# Altium footprint library semubot_lidar_driver_footprints.PcbLib: 25 footprints (part 2 of 2)
Each footprint in its own frame and in the unit in brackets; x right, y up, seen from the top. Pads: shape width x height; smd on the part's side, far side on the other; paste and mask are expansions set on the pad; w line width, h text height; cw(c..) or ccw(c..) is an arc to the next point about the centre after c.
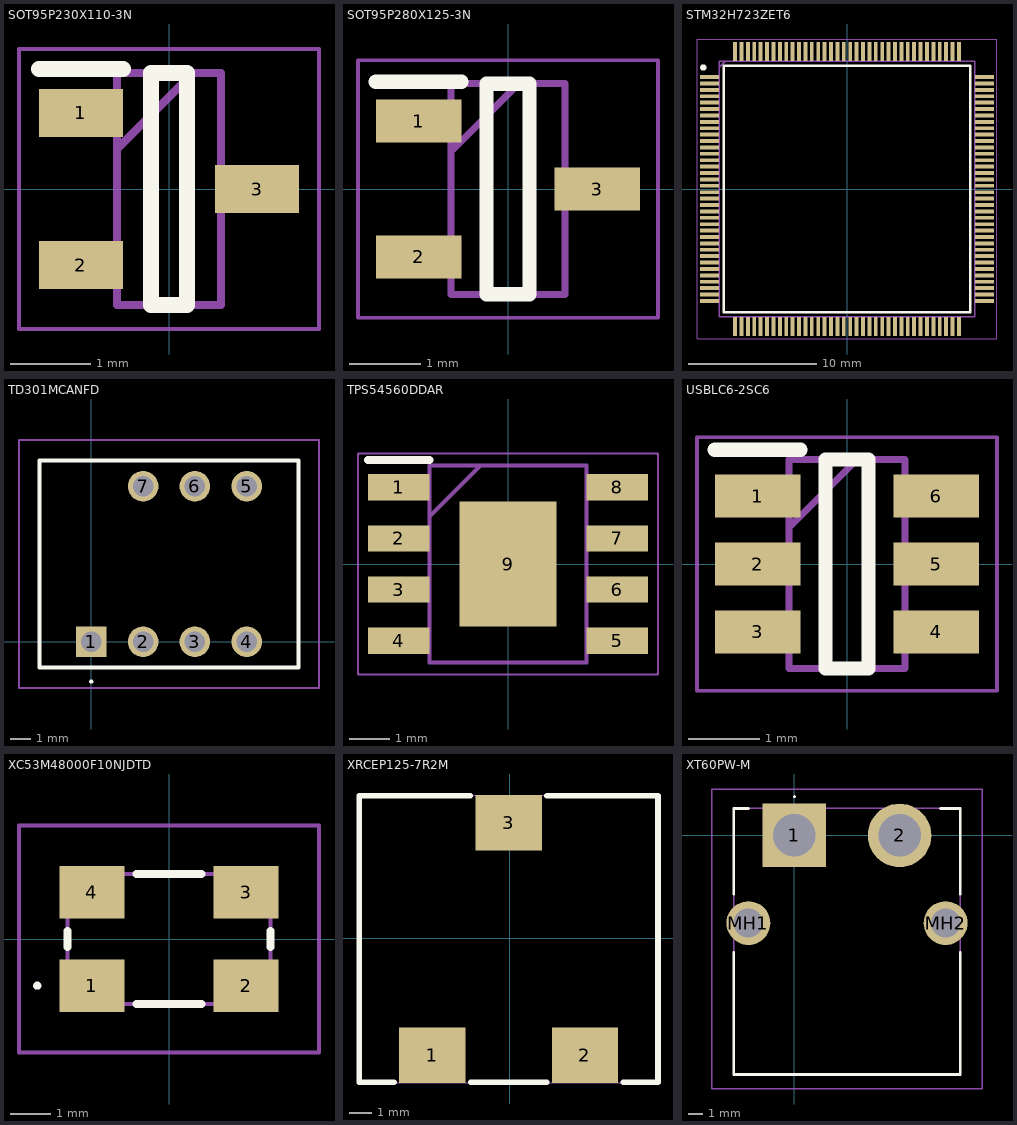
[diagram p1: the footprints below, top view; thin cyan lines are the x and y axes]

## SOT95P230X110-3N [mm]
pads (3):
  rect 1.05x0.6 smd: 1(-1.1,0.95) 2(-1.1,-0.95) 3(1.1,0)
Top Overlay:
  lines w0.2: -1.625,1.5 -0.575,1.5 ; -0.225,-1.45 0.225,-1.45 0.225,1.45 -0.225,1.45 -0.225,-1.45
Mechanical 13:
  lines w0.1: -0.65,0.5 0.3,1.45 ; -0.65,-1.45 0.65,-1.45 0.65,1.45 -0.65,1.45 -0.65,-1.45
Mechanical 15:
  lines w0.05: -1.875,-1.75 1.875,-1.75 1.875,1.75 -1.875,1.75 -1.875,-1.75
3D body "PESD1CAN.stp": height 1.1, standoff 0, extent -1.15,-1.45 1.15,1.45

## SOT95P280X125-3N [mm]
pads (3):
  rect 1.2x0.6 smd: 1(-1.25,0.95) 2(-1.25,-0.95) 3(1.25,0)
Top Overlay:
  lines w0.2: -1.85,1.5 -0.65,1.5 ; -0.3,-1.475 0.3,-1.475 0.3,1.475 -0.3,1.475 -0.3,-1.475
Mechanical 13:
  lines w0.1: -0.8,0.525 0.15,1.475 ; -0.8,-1.475 0.8,-1.475 0.8,1.475 -0.8,1.475 -0.8,-1.475
Mechanical 15:
  lines w0.05: -2.1,-1.8 2.1,-1.8 2.1,1.8 -2.1,1.8 -2.1,-1.8
3D body "AO3401A.stp": height 1.25, standoff 0, extent -1.4,-1.475 1.4,1.475

## STM32H723ZET6 [mm]
pads (144):
  rect 1.475x0.3 smd: 1(-10.738,8.75) 2(-10.738,8.25) 3(-10.738,7.75) 4(-10.738,7.25) 5(-10.738,6.75) 6(-10.738,6.25) 7(-10.738,5.75) 8(-10.738,5.25) 9(-10.738,4.75) 10(-10.738,4.25) 11(-10.738,3.75) 12(-10.738,3.25) 13(-10.738,2.75) 14(-10.738,2.25) 15(-10.738,1.75) 16(-10.738,1.25) 17(-10.738,0.75) 18(-10.738,0.25) 19(-10.738,-0.25) 20(-10.738,-0.75) 21(-10.738,-1.25) 22(-10.738,-1.75) 23(-10.738,-2.25) 24(-10.738,-2.75) 25(-10.738,-3.25) 26(-10.738,-3.75) 27(-10.738,-4.25) 28(-10.738,-4.75) 29(-10.738,-5.25) 30(-10.738,-5.75) 31(-10.738,-6.25) 32(-10.738,-6.75) 33(-10.738,-7.25) 34(-10.738,-7.75) 35(-10.738,-8.25) 36(-10.738,-8.75) 73(10.738,-8.75) 74(10.738,-8.25) 75(10.738,-7.75) 76(10.738,-7.25) 77(10.738,-6.75) 78(10.738,-6.25) 79(10.738,-5.75) 80(10.738,-5.25) 81(10.738,-4.75) 82(10.738,-4.25) 83(10.738,-3.75) 84(10.738,-3.25) 85(10.738,-2.75) 86(10.738,-2.25) 87(10.738,-1.75) 88(10.738,-1.25) 89(10.738,-0.75) 90(10.738,-0.25) 91(10.738,0.25) 92(10.738,0.75) 93(10.738,1.25) 94(10.738,1.75) 95(10.738,2.25) 96(10.738,2.75) 97(10.738,3.25) 98(10.738,3.75) 99(10.738,4.25) 100(10.738,4.75) 101(10.738,5.25) 102(10.738,5.75) 103(10.738,6.25) 104(10.738,6.75) 105(10.738,7.25) 106(10.738,7.75) 107(10.738,8.25) 108(10.738,8.75)
  rect 0.3x1.475 smd: 37(-8.75,-10.738) 38(-8.25,-10.738) 39(-7.75,-10.738) 40(-7.25,-10.738) 41(-6.75,-10.738) 42(-6.25,-10.738) 43(-5.75,-10.738) 44(-5.25,-10.738) 45(-4.75,-10.738) 46(-4.25,-10.738) 47(-3.75,-10.738) 48(-3.25,-10.738) 49(-2.75,-10.738) 50(-2.25,-10.738) 51(-1.75,-10.738) 52(-1.25,-10.738) 53(-0.75,-10.738) 54(-0.25,-10.738) 55(0.25,-10.738) 56(0.75,-10.738) 57(1.25,-10.738) 58(1.75,-10.738) 59(2.25,-10.738) 60(2.75,-10.738) 61(3.25,-10.738) 62(3.75,-10.738) 63(4.25,-10.738) 64(4.75,-10.738) 65(5.25,-10.738) 66(5.75,-10.738) 67(6.25,-10.738) 68(6.75,-10.738) 69(7.25,-10.738) 70(7.75,-10.738) 71(8.25,-10.738) 72(8.75,-10.738) 109(8.75,10.738) 110(8.25,10.738) 111(7.75,10.738) 112(7.25,10.738) 113(6.75,10.738) 114(6.25,10.738) 115(5.75,10.738) 116(5.25,10.738) 117(4.75,10.738) 118(4.25,10.738) 119(3.75,10.738) 120(3.25,10.738) 121(2.75,10.738) 122(2.25,10.738) 123(1.75,10.738) 124(1.25,10.738) 125(0.75,10.738) 126(0.25,10.738) 127(-0.25,10.738) 128(-0.75,10.738) 129(-1.25,10.738) 130(-1.75,10.738) 131(-2.25,10.738) 132(-2.75,10.738) 133(-3.25,10.738) 134(-3.75,10.738) 135(-4.25,10.738) 136(-4.75,10.738) 137(-5.25,10.738) 138(-5.75,10.738) 139(-6.25,10.738) 140(-6.75,10.738) 141(-7.25,10.738) 142(-7.75,10.738) 143(-8.25,10.738) 144(-8.75,10.738)
Top Overlay:
  circle w0.25: c-11.225,9.5 r0.125
  lines w0.2: -9.65,-9.65 -9.65,9.65 9.65,9.65 9.65,-9.65 -9.65,-9.65
Mechanical 13:
  lines w0.1: -10,9.5 -9.5,10 ; -10,-10 -10,10 10,10 10,-10 -10,-10
Mechanical 15:
  lines w0.05: -11.725,-11.725 -11.725,11.725 11.725,11.725 11.725,-11.725 -11.725,-11.725
3D body "STM32H723ZET6.stp": height 1.6, standoff 0, extent -10.948,-10.948 10.948,10.948

## TD301MCANFD [mm]
pads (7):
  rect 1.5x1.5 hole 1: 1(0,0)
  round 1.5 hole 1: 2(2.54,0) 3(5.08,0) 4(7.62,0) 5(7.62,7.62) 6(5.08,7.62) 7(2.54,7.62)
Top Overlay:
  lines w0.1: 0,-2 ccw(c0,-1.95) 0,-1.9 ccw(c0,-1.95) 0,-2
  lines w0.2: -2.54,-1.27 10.16,-1.27 10.16,8.89 -2.54,8.89 -2.54,-1.27
Mechanical 13:
  lines w0.1: -2.54,-1.27 10.16,-1.27 10.16,8.89 -2.54,8.89 -2.54,-1.27
Mechanical 15:
  lines w0.1: -3.54,-2.27 11.16,-2.27 11.16,9.89 -3.54,9.89 -3.54,-2.27
3D body "TD301MCANFD.stp": height 8.55, standoff -5, extent -2.54,-1.27 10.16,8.89

## TPS54560DDAR [mm]
pads (9):
  rect 1.525x0.65 smd: 1(-2.712,1.905) 2(-2.712,0.635) 3(-2.712,-0.635) 4(-2.712,-1.905) 5(2.712,-1.905) 6(2.712,-0.635) 7(2.712,0.635) 8(2.712,1.905)
  rect 2.4x3.1 smd: 9(0,0)
Top Overlay:
  lines w0.2: -3.475,2.58 -1.95,2.58
Mechanical 13:
  lines w0.1: -1.95,1.18 -0.68,2.45 ; -1.95,-2.45 -1.95,2.45 1.95,2.45 1.95,-2.45 -1.95,-2.45
Mechanical 15:
  lines w0.05: -3.725,-2.75 -3.725,2.75 3.725,2.75 3.725,-2.75 -3.725,-2.75
3D body "TPS54560DDAR.stp": height 1.57, standoff 0, extent -3,-2.45 3,2.45

## USBLC6-2SC6 [mm]
pads (6):
  rect 1.2x0.6 smd: 1(-1.25,0.95) 2(-1.25,0) 3(-1.25,-0.95) 4(1.25,-0.95) 5(1.25,0) 6(1.25,0.95)
Top Overlay:
  lines w0.2: -1.85,1.6 -0.65,1.6 ; -0.3,-1.462 0.3,-1.462 0.3,1.462 -0.3,1.462 -0.3,-1.462
Mechanical 13:
  lines w0.1: -0.812,0.512 0.138,1.462 ; -0.812,-1.462 0.812,-1.462 0.812,1.462 -0.812,1.462 -0.812,-1.462
Mechanical 15:
  lines w0.05: -2.1,-1.775 2.1,-1.775 2.1,1.775 -2.1,1.775 -2.1,-1.775
3D body "USBLC6-2SC6.stp": height 1.45, standoff 0, extent -1.4,-1.462 1.4,1.462

## XC53M48000F10NJDTD [mm]
pads (4):
  rect 1.6x1.3 smd: 1(-1.9,-1.15) 2(1.9,-1.15) 3(1.9,1.15) 4(-1.9,1.15)
Top Overlay:
  lines w0.1: -3.3,-1.15 cw(c-3.25,-1.15) -3.2,-1.15 cw(c-3.25,-1.15) -3.3,-1.15
  lines w0.2: -2.5,-0.2 -2.5,0.2 ; -0.8,-1.6 0.8,-1.6 ; -0.8,1.6 0.8,1.6 ; 2.5,-0.2 2.5,0.2
Mechanical 13:
  lines w0.1: -2.5,-1.6 -2.5,1.6 2.5,1.6 2.5,-1.6 -2.5,-1.6
Mechanical 15:
  lines w0.1: -3.7,-2.8 -3.7,2.8 3.7,2.8 3.7,-2.8 -3.7,-2.8
3D body "XC53M4-8.000-F10NJDTD.stp": height 0.9, standoff 0, extent -2.57,-1.67 2.57,1.67

## XRCEP125-7R2M [mm]
pads (3):
  rect 3x2.5 smd: 1(-3.498,-5.294) 2(3.402,-5.294) 3(-0.048,5.206)
Top Overlay:
  lines w0.254: -5.229,-6.521 -6.798,-6.521 -6.798,6.433 -1.779,6.433 ; -1.767,-6.521 1.671,-6.521 ; 1.683,6.433 6.702,6.433 6.702,-6.521 5.133,-6.521
Mechanical 7:
  lines w0.051: -6.798,-6.544 6.702,-6.544 6.702,6.456 -6.798,6.456 -6.798,-6.544
Mechanical 8:
  region: -6.738,-6.544 -6.738,-6.549 -6.739,-6.558 -6.742,-6.567 -6.747,-6.575 -6.752,-6.583 -6.759,-6.59 -6.767,-6.595 -6.775,-6.6 -6.784,-6.603 -6.793,-6.604 -6.803,-6.604 -6.812,-6.603 -6.821,-6.6 -6.829,-6.595 -6.837,-6.59 -6.844,-6.583 -6.849,-6.575 -6.854,-6.567 -6.857,-6.558 -6.858,-6.549 -6.858,-6.544 -6.858,-6.539 -6.857,-6.53 -6.854,-6.521 -6.849,-6.513 -6.844,-6.505 -6.837,-6.498 -6.829,-6.493 -6.821,-6.488 -6.812,-6.485 -6.803,-6.484 -6.793,-6.484 -6.784,-6.485 -6.775,-6.488 -6.767,-6.493 -6.759,-6.498 -6.752,-6.505 -6.747,-6.513 -6.742,-6.521 -6.739,-6.53 -6.738,-6.539
Mechanical 9:
  region: -1.298,6.206 1.202,6.206 1.202,4.206 -1.298,4.206
  region: 2.152,-4.294 4.652,-4.294 4.652,-6.294 2.152,-6.294
  region: -4.748,-4.294 -2.248,-4.294 -2.248,-6.294 -4.748,-6.294

## XT60PW-M [mm]
pads (4):
  rect 4.35x4.35 hole 2.9: 1(0,0)
  round 4.35 hole 2.9: 2(7.2,0)
  round 3 hole 2: MH1(-3.15,-6) MH2(10.35,-6)
Top Overlay:
  lines w0.1: 0,2.6 ccw(c0,2.65) 0,2.7 ccw(c0,2.65) 0,2.6
  lines w0.2: -4.15,-8 -4.15,-16.35 11.35,-16.35 11.35,-8 ; -4.15,-4 -4.15,1.85 -3.15,1.85 ; 10,1.85 11.35,1.85 11.35,-4
Mechanical 13:
  lines w0.1: -4.15,-16.35 11.35,-16.35 11.35,1.85 -4.15,1.85 -4.15,-16.35
Mechanical 15:
  lines w0.1: -5.65,-17.35 12.85,-17.35 12.85,3.175 -5.65,3.175 -5.65,-17.35
3D body "XT60PW-M.stp": height 8.45, standoff -2.5, extent -4.35,-16.228 11.55,2.05